# Altium schematic symbol library PH1-03-UA.SchLib: 1 symbol
Pins are listed as number, name and electrical type; pins without a type are passive.

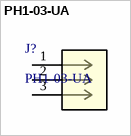
[diagram p0: symbol PH1-03-UA]

## PH1-03-UA
designator J?
Description; Manufacturer_Name: ADAM TECHNOLOGIES INC; Copyright: Copyright (C) 2025 Ultra Librarian. All rights reserved.; Manufacturer_Part_Number: PH1-03-UA; RefDes: RefDes; Type: Type
footprint CONN_PH1-03-UA_ADM
pins: 1, 2, 3